# Altium footprint library GD25Q128ESIGR.PcbLib: 1 footprints
Each footprint in its own frame and in the unit in brackets; x right, y up, seen from the top. Pads: shape width x height; smd on the part's side, far side on the other; paste and mask are expansions set on the pad; w line width, h text height; cw(c..) or ccw(c..) is an arc to the next point about the centre after c.
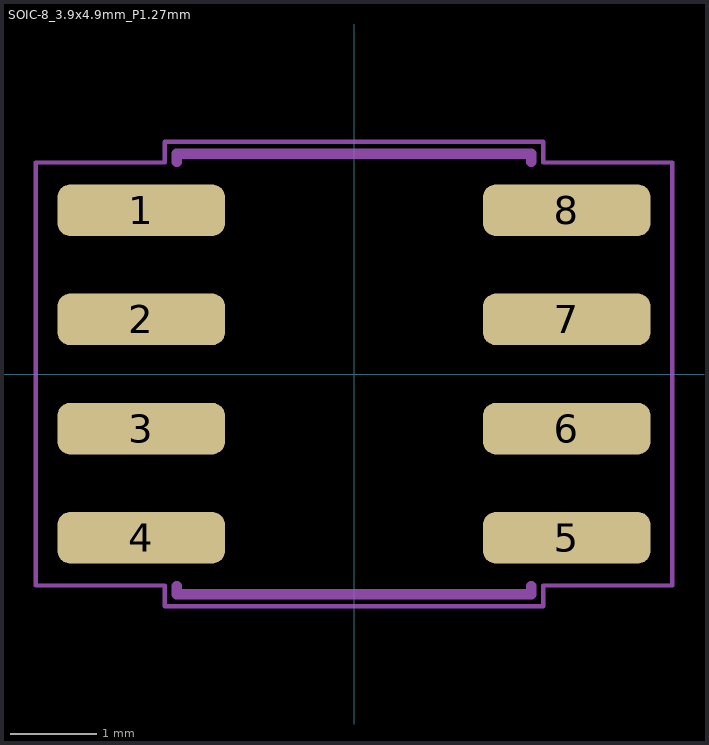
[diagram p0: the footprint, top view; thin cyan lines are the x and y axes]

## SOIC-8_3.9x4.9mm_P1.27mm [mm]
pads (8):
  rrect0% 1.95x0.6 smd: 1(-2.475,1.905) 2(-2.475,0.635) 3(-2.475,-0.635) 4(-2.475,-1.905) 5(2.475,-1.905) 6(2.475,-0.635) 7(2.475,0.635) 8(2.475,1.905)
Mechanical 13:
  lines w0.12: -2.06,-2.465 -2.06,-2.56 2.06,-2.56 2.06,-2.465 ; -2.06,2.465 -2.06,2.56 2.06,2.56 2.06,2.465
Mechanical 15:
  lines w0.05: -3.7,-2.46 -3.7,2.46 -2.2,2.46 -2.2,2.7 2.2,2.7 2.2,2.46 3.7,2.46 3.7,-2.46 2.2,-2.46 2.2,-2.7 -2.2,-2.7 -2.2,-2.46 -3.7,-2.46
3D body "GD25Q128ESIGR.step": height 1.76, standoff 0, extent -3.704,-2.459 3.704,2.459